# Altium footprint library Footprint-Lib-PhilsLab.PcbLib: 544 footprints (part 28 of 34)
Each footprint in its own frame and in the unit in brackets; x right, y up, seen from the top. Pads: shape width x height; smd on the part's side, far side on the other; paste and mask are expansions set on the pad; w line width, h text height; cw(c..) or ccw(c..) is an arc to the next point about the centre after c.
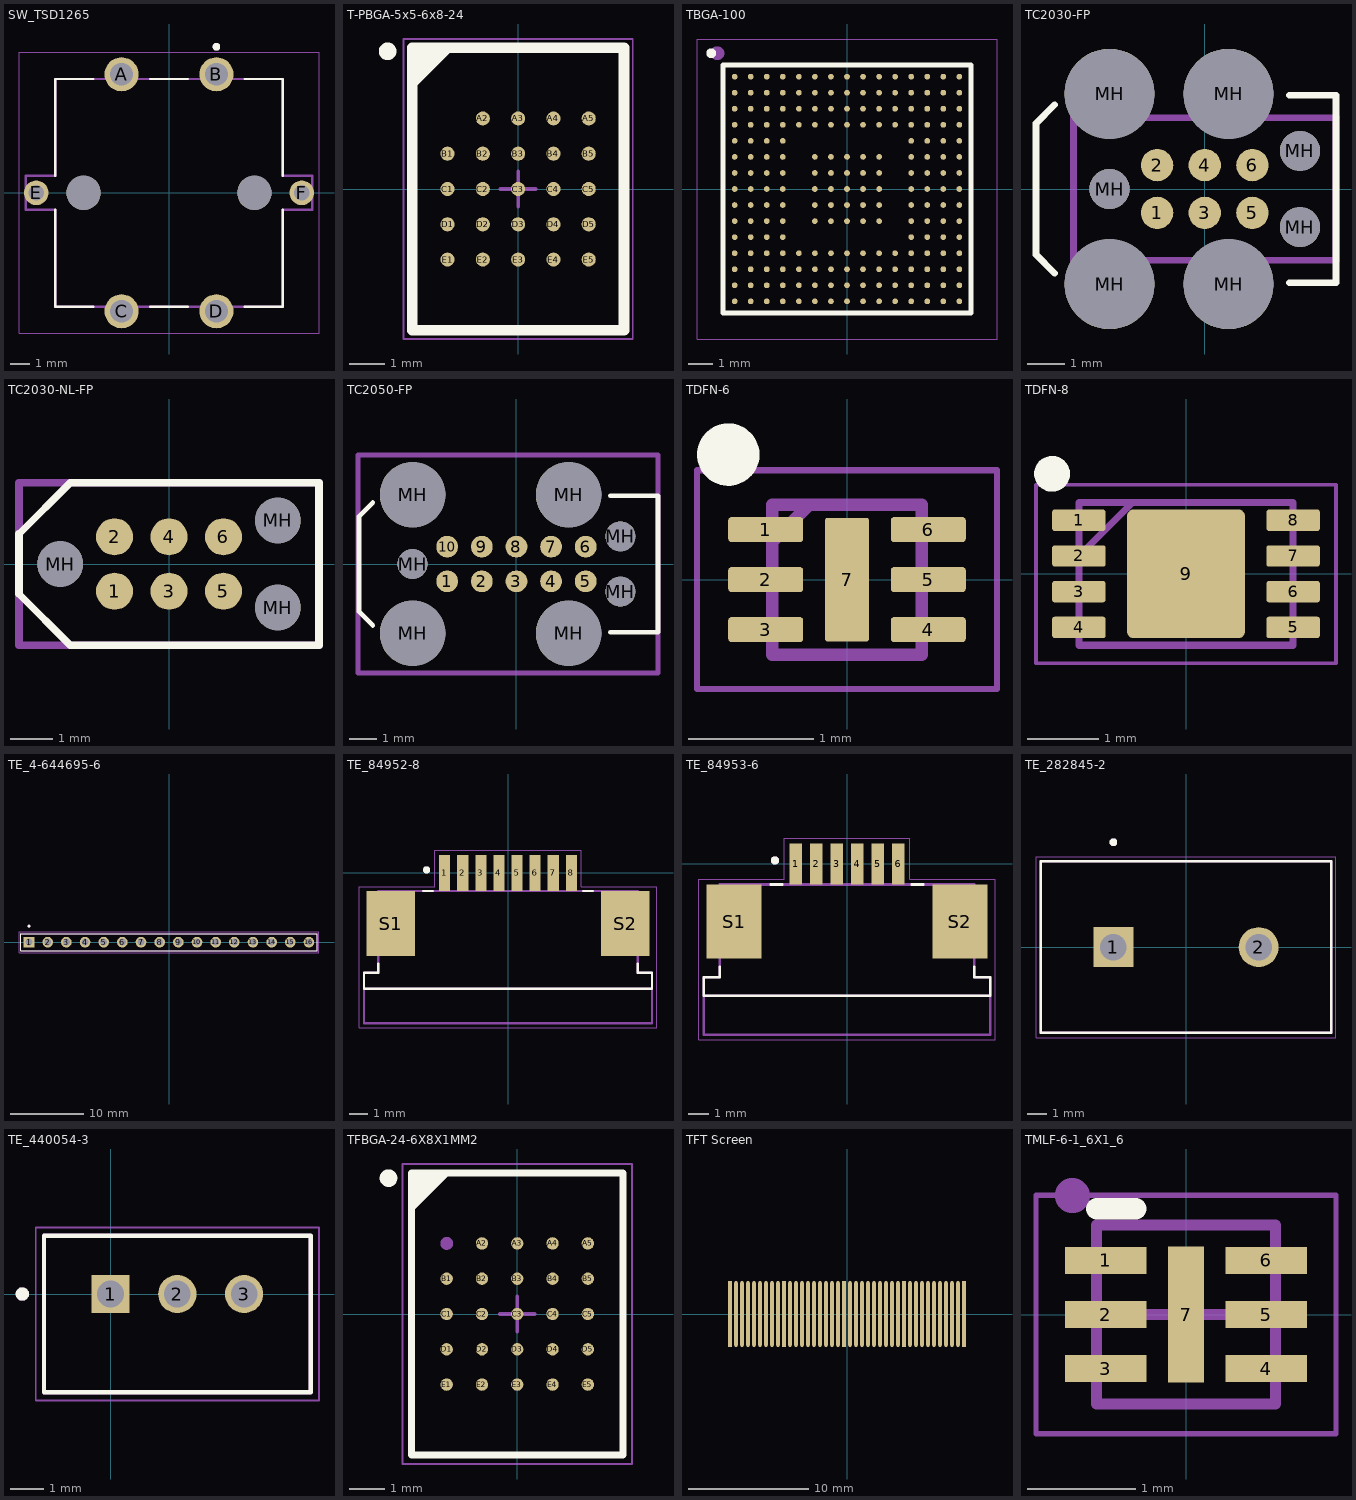
[diagram p27: the footprints below, top view; thin cyan lines are the x and y axes]

## SW_TSD1265 [mm]
pads (8):
  round 1.8 hole 1.2: A(-2.5,6.25) B(2.5,6.25) C(-2.5,-6.25) D(2.5,-6.25)
  round 1.308 hole 0.8: E(-7,0) F(7,0)
  round 1.8 hole 1.8 unplated: ""(-4.5,0) ""(4.5,0)
Top Overlay:
  circle w0.2: c2.5,7.7 r0.1
  lines w0.127: -6,-0.9 -6,-6 -4,-6 ; -6,0.9 -6,6 -4,6 ; -1,-6 1,-6 ; -1,6 1,6 ; 4,-6 6,-6 6,-0.9 ; 4,6 6,6 6,0.9
Mechanical 13:
  circle w0.2: c2.5,7.7 r0.1
  lines w0.127: -7.55,-0.9 -7.55,0.9 -6,0.9 -6,6 6,6 6,0.9 7.55,0.9 7.55,-0.9 6,-0.9 6,-6 -6,-6 -6,-0.9 -7.55,-0.9
Mechanical 15:
  lines w0.05: -7.91,-7.4 -7.91,7.4 7.91,7.4 7.91,-7.4 -7.91,-7.4
3D body "step_temp.STEP": height 6.5, standoff -5.7, extent -7.55,-6.65 7.55,6.65

## T-PBGA-5x5-6x8-24 [mm]
height 1.2
pads (24):
  round 0.4 smd mask+0.05: A2(-1,2) A3(0,2) A4(1,2) A5(2,2) B1(-2,1) B2(-1,1) B3(0,1) B4(1,1) B5(2,1) C1(-2,0) C2(-1,0) C3(0,0) C4(1,0) C5(2,0) D1(-2,-1) D2(-1,-1) D3(0,-1) D4(1,-1) D5(2,-1) E1(-2,-2) E2(-1,-2) E3(0,-2) E4(1,-2) E5(2,-2)
Top Overlay:
  circle w0.25: c-3.7,3.9 r0.125
  region: -2,4 -3,3 -3,4
  lines w0.3: -3,3 -2,4 ; -3,-4 -3,4 3,4 3,-4 -3,-4
Mechanical 13:
  lines w0.1: -3,-4 -3,4 3,4 3,-4 -3,-4
Mechanical 15:
  lines w0.05: -3.25,-4.25 -3.25,4.25 3.25,4.25 3.25,-4.25 -3.25,-4.25
  lines w0.1: -0.5,0 0.5,0 ; 0,-0.5 0,0.5
3D body "T-PBGA-5x5-6x8-24.step": height 1.2, standoff 0, extent -3,-4 3,4

## TBGA-100 [mm]
pads (201):
  round 0.232 smd: A1(-4.55,4.55) A2(-3.9,4.55) A3(-3.25,4.55) A4(-2.6,4.55) A5(-1.95,4.55) A6(-1.3,4.55) A7(-0.65,4.55) A8(0,4.55) A9(0.65,4.55) A10(1.3,4.55) A11(1.95,4.55) A12(2.6,4.55) A13(3.25,4.55) A14(3.9,4.55) A15(4.55,4.55) B1(-4.55,3.9) B2(-3.9,3.9) B3(-3.25,3.9) B4(-2.6,3.9) B5(-1.95,3.9) B6(-1.3,3.9) B7(-0.65,3.9) B8(0,3.9) B9(0.65,3.9) B10(1.3,3.9) B11(1.95,3.9) B12(2.6,3.9) B13(3.25,3.9) B14(3.9,3.9) B15(4.55,3.9) C1(-4.55,3.25) C2(-3.9,3.25) C3(-3.25,3.25) C4(-2.6,3.25) C5(-1.95,3.25) C6(-1.3,3.25) C7(-0.65,3.25) C8(0,3.25) C9(0.65,3.25) C10(1.3,3.25) C11(1.95,3.25) C12(2.6,3.25) C13(3.25,3.25) C14(3.9,3.25) C15(4.55,3.25) D1(-4.55,2.6) D2(-3.9,2.6) D3(-3.25,2.6) D4(-2.6,2.6) D5(-1.95,2.6) D6(-1.3,2.6) D7(-0.65,2.6) D8(0,2.6) D9(0.65,2.6) D10(1.3,2.6) D11(1.95,2.6) D12(2.6,2.6) D13(3.25,2.6) D14(3.9,2.6) D15(4.55,2.6) E1(-4.55,1.95) E2(-3.9,1.95) E3(-3.25,1.95) E4(-2.6,1.95) E12(2.6,1.95) E13(3.25,1.95) E14(3.9,1.95) E15(4.55,1.95) F1(-4.55,1.3) F2(-3.9,1.3) F3(-3.25,1.3) F4(-2.6,1.3) F6(-1.3,1.3) F7(-0.65,1.3) F8(0,1.3) F9(0.65,1.3) F10(1.3,1.3) F12(2.6,1.3) F13(3.25,1.3) F14(3.9,1.3) F15(4.55,1.3) G1(-4.55,0.65) G2(-3.9,0.65) G3(-3.25,0.65) G4(-2.6,0.65) G6(-1.3,0.65) G7(-0.65,0.65) G8(0,0.65) G9(0.65,0.65) G10(1.3,0.65) G12(2.6,0.65) G13(3.25,0.65) G14(3.9,0.65) G15(4.55,0.65) H1(-4.55,0) H2(-3.9,0) H3(-3.25,0) H4(-2.6,0) H6(-1.3,0) H7(-0.65,0) H8(0,0) H9(0.65,0) H10(1.3,0) H12(2.6,0) H13(3.25,0) H14(3.9,0) H15(4.55,0) J1(-4.55,-0.65) J2(-3.9,-0.65) J3(-3.25,-0.65) J4(-2.6,-0.65) J6(-1.3,-0.65) J7(-0.65,-0.65) J8(0,-0.65) J9(0.65,-0.65) J10(1.3,-0.65) J12(2.6,-0.65) J13(3.25,-0.65) J14(3.9,-0.65) J15(4.55,-0.65) K1(-4.55,-1.3) K2(-3.9,-1.3) K3(-3.25,-1.3) K4(-2.6,-1.3) K6(-1.3,-1.3) K7(-0.65,-1.3) K8(0,-1.3) K9(0.65,-1.3) K10(1.3,-1.3) K12(2.6,-1.3) K13(3.25,-1.3) K14(3.9,-1.3) K15(4.55,-1.3) L1(-4.55,-1.95) L2(-3.9,-1.95) L3(-3.25,-1.95) L4(-2.6,-1.95) L12(2.6,-1.95) L13(3.25,-1.95) L14(3.9,-1.95) L15(4.55,-1.95) M1(-4.55,-2.6) M2(-3.9,-2.6) M3(-3.25,-2.6) M4(-2.6,-2.6) M5(-1.95,-2.6) M6(-1.3,-2.6) M7(-0.65,-2.6) M8(0,-2.6) M9(0.65,-2.6) M10(1.3,-2.6) M11(1.95,-2.6) M12(2.6,-2.6) M13(3.25,-2.6) M14(3.9,-2.6) M15(4.55,-2.6) N1(-4.55,-3.25) N2(-3.9,-3.25) N3(-3.25,-3.25) N4(-2.6,-3.25) N5(-1.95,-3.25) N6(-1.3,-3.25) N7(-0.65,-3.25) N8(0,-3.25) N9(0.65,-3.25) N10(1.3,-3.25) N11(1.95,-3.25) N12(2.6,-3.25) N13(3.25,-3.25) N14(3.9,-3.25) N15(4.55,-3.25) P1(-4.55,-3.9) P2(-3.9,-3.9) P3(-3.25,-3.9) P4(-2.6,-3.9) P5(-1.95,-3.9) P6(-1.3,-3.9) P7(-0.65,-3.9) P8(0,-3.9) P9(0.65,-3.9) P10(1.3,-3.9) P11(1.95,-3.9) P12(2.6,-3.9) P13(3.25,-3.9) P14(3.9,-3.9) P15(4.55,-3.9) R1(-4.55,-4.55) R2(-3.9,-4.55) R3(-3.25,-4.55) R4(-2.6,-4.55) R5(-1.95,-4.55) R6(-1.3,-4.55) R7(-0.65,-4.55) R8(0,-4.55) R9(0.65,-4.55) R10(1.3,-4.55) R11(1.95,-4.55) R12(2.6,-4.55) R13(3.25,-4.55) R14(3.9,-4.55) R15(4.55,-4.55)
Top Overlay:
  circle w0.2: c-5.5,5.5 r0.1
  lines w0.2: -5.016,-5.016 5.016,-5.016 5.016,5.016 -5.016,5.016 -5.016,-5.016
Mechanical 13:
  circle w0.5: c-5.25,5.5 r0.031
  lines w0.1: -5,-5 5,-5 5,5 -5,5 -5,-5
  text "'.Designator'" at -5.815,-0.9 h1
Mechanical 15:
  lines w0.05: -6.075,-6.075 6.075,-6.075 6.075,6.075 -6.075,6.075 -6.075,-6.075
3D body "STM32H730IBK6Q.stp": height 0.6, standoff 0, extent -5,-5 5,5

## TC2030-FP [mm]
pads (13):
  round 0.863 smd paste-0.432: 1(-1.27,-0.635) 2(-1.27,0.635) 3(0,-0.635) 4(0,0.635) 5(1.27,-0.635) 6(1.27,0.635)
  round 2.4 hole 2.4 unplated: MH(-2.54,-2.54) MH(-2.54,2.54) MH(0.635,-2.54) MH(0.635,2.54)
  round 1.067 hole 1.067 unplated: MH(-2.54,0) MH(2.54,-1.016) MH(2.54,1.016)
Top Overlay:
  lines w0.175: -4,-2.25 -4.5,-1.75 -4.5,1.75 -4,2.25 ; 2.25,-2.5 3.5,-2.5 3.5,2.5 2.25,2.5
Mechanical 13:
  lines w0.175: -3.5,-1.9 -3.5,1.9 3.5,1.9 3.5,-1.9 -3.5,-1.9
  text "'.Designator'" at -8.633,-0.635 h1.52

## TC2030-NL-FP [mil]
pads (9):
  round 33.98 smd paste-16.99: 1(-50,-25) 2(-50,25) 3(0,-25) 4(0,25) 5(50,-25) 6(50,25)
  round 42.01 hole 42.01 unplated: MH(-100,0) MH(100,-40) MH(100,40)
Top Overlay:
  lines w6.89: -137.8,-27.56 -137.8,27.56 -90.55,74.8 137.8,74.8 137.8,-74.8 -90.55,-74.8 -137.8,-27.56
Mechanical 13:
  lines w6.89: -137.8,-74.8 -137.8,74.8 137.8,74.8 137.8,-74.8 -137.8,-74.8
  text "'.Designator'" at -339.89,-24.99 h60

## TC2050-FP [mm]
pads (17):
  round 0.8 smd paste-0.4: 1(-2.54,-0.635) 2(-1.27,-0.635) 3(0,-0.635) 4(1.27,-0.635) 5(2.54,-0.635) 6(2.54,0.635) 7(1.27,0.635) 8(0,0.635) 9(-1.27,0.635) 10(-2.54,0.635)
  round 2.4 hole 2.4 unplated: MH(-3.81,-2.54) MH(-3.81,2.54) MH(1.91,-2.54) MH(1.91,2.54)
  round 1.1 hole 1.1 unplated: MH(-3.81,0) MH(3.81,-1.016) MH(3.81,1.016)
Top Overlay:
  lines w0.175: -5.27,-2.25 -5.77,-1.75 -5.77,1.75 -5.27,2.25 ; 3.44,-2.5 5.19,-2.5 5.19,2.5 3.44,2.5
Mechanical 13:
  lines w0.175: -5.81,-4 5.19,-4 5.19,4 -5.81,4 -5.81,-4
  text "'.Designator'" at -8.633,-0.635 h1.52

## TDFN-6 [mm]
pads (7):
  rrect25% 0.6x0.2 smd mask+0.05: 1(-0.65,0.4) 2(-0.65,0) 3(-0.65,-0.4) 4(0.65,-0.4) 5(0.65,0) 6(0.65,0.4)
  rrect10% 0.35x0.99 smd mask+0.05: 7(0,0)
Top Overlay:
  circle w0.25: c-0.95,1 r0.125
Mechanical 13:
  lines w0.1: -0.6,0.3 -0.3,0.6 ; -0.6,-0.6 -0.6,0.6 0.6,0.6 0.6,-0.6 -0.6,-0.6
  text "'.Designator'" at -5.84,-0.925 h1
Mechanical 15:
  lines w0.05: -1.2,-0.875 -1.2,0.875 1.2,0.875 1.2,-0.875 -1.2,-0.875
3D body "MIC5528-3.3YMT-TR.stp": height 0.6, standoff 0, extent -0.65,-0.6 0.65,0.6

## TDFN-8 [mm]
pads (9):
  rrect25% 0.75x0.3 smd mask+0.05: 1(-1.5,0.75) 2(-1.5,0.25) 3(-1.5,-0.25) 4(-1.5,-0.75) 5(1.5,-0.75) 6(1.5,-0.25) 7(1.5,0.25) 8(1.5,0.75)
  rrect10% 1.65x1.8 smd mask+0.05: 9(0,0)
Top Overlay:
  circle w0.25: c-1.875,1.4 r0.125
Mechanical 13:
  lines w0.1: -1.5,0.25 -0.75,1 ; -1.5,-1 -1.5,1 1.5,1 1.5,-1 -1.5,-1
  text "'.Designator'" at -5.84,-0.925 h1
Mechanical 15:
  lines w0.05: -2.1,-1.25 -2.1,1.25 2.1,1.25 2.1,-1.25 -2.1,-1.25
3D body "MCP2557FDT-H_MNY.stp": height 0.8, standoff 0, extent -1.55,-1 1.55,1

## TE_4-644695-6 [mm]
pads (16):
  rect 1.448x1.448 hole 0.94: 1(-19.05,0)
  round 1.448 hole 0.94: 2(-16.51,0) 3(-13.97,0) 4(-11.43,0) 5(-8.89,0) 6(-6.35,0) 7(-3.81,0) 8(-1.27,0) 9(1.27,0) 10(3.81,0) 11(6.35,0) 12(8.89,0) 13(11.43,0) 14(13.97,0) 15(16.51,0) 16(19.05,0)
Top Overlay:
  circle w0.2: c-19.05,2.168 r0.1
  lines w0.127: -20.168,-1.168 -20.168,1.168 20.168,1.168 20.168,-1.168 -20.168,-1.168
Mechanical 13:
  circle w0.2: c-19.05,2.168 r0.1
  lines w0.127: -20.168,-1.168 -20.168,1.168 20.168,1.168 20.168,-1.168 -20.168,-1.168
Mechanical 15:
  lines w0.05: -20.418,-1.418 -20.418,1.418 20.418,1.418 20.418,-1.418 -20.418,-1.418

## TE_84952-8 [mm]
pads (10):
  rect 0.61x2 smd: 1(-3.5,0) 2(-2.5,0) 3(-1.5,0) 4(-0.5,0) 5(0.5,0) 6(1.5,0) 7(2.5,0) 8(3.5,0)
  rect 2.68x3.6 smd: S1(-6.49,-2.8) S2(6.49,-2.8)
Top Overlay:
  circle w0.2: c-4.5,0.17 r0.1
  lines w0.127: -7.175,-5 -7.175,-5.51 -7.96,-5.51 -7.96,-6.4 7.96,-6.4 7.96,-5.51 7.175,-5.51 7.175,-5 ; -4.7,-1 -4.14,-1 ; 4.14,-1 4.7,-1
Mechanical 13:
  circle w0.2: c-4.5,0.17 r0.1
  lines w0.127: -7.96,-6.4 -7.96,-5.51 -7.175,-5.51 -7.175,-1 7.175,-1 7.175,-5.51 7.96,-5.51 7.96,-6.4 ; -7.96,-6.4 7.96,-6.4 ; -7.96,-6.4 -7.96,-8.3 7.96,-8.3 7.96,-6.4
Mechanical 15:
  lines w0.05: -8.21,-8.55 -8.21,-0.75 -4.055,-0.75 -4.055,1.25 4.055,1.25 4.055,-0.75 8.21,-0.75 8.21,-8.55 -8.21,-8.55
3D body "Download_STP_68610814122_rev1.stp": height 3, standoff 0, extent -7.5,-6.25 7.5,0.85

## TE_84953-6 [mm]
height 2.74
pads (8):
  rect 0.61x2 smd paste+0 mask+0.102: 1(-2.5,0) 2(-1.5,0) 3(-0.5,0) 4(0.5,0) 5(1.5,0) 6(2.5,0)
  rect 2.68x3.6 smd paste+0 mask+0.102: S1(-5.49,-2.8) S2(5.49,-2.8)
Top Overlay:
  circle w0.2: c-3.5,0.17 r0.1
  lines w0.127: -6.175,-5 -6.175,-5.51 -6.96,-5.51 -6.96,-6.4 6.96,-6.4 6.96,-5.51 6.175,-5.51 6.175,-5 ; -3.7,-1 -3.14,-1 ; 3.14,-1 3.7,-1
Mechanical 13:
  circle w0.2: c-3.5,0.17 r0.1
  lines w0.127: -6.96,-6.4 -6.96,-8.3 6.96,-8.3 6.96,-6.4 ; -6.96,-6.4 6.96,-6.4 ; -6.96,-6.4 -6.96,-5.51 -6.175,-5.51 -6.175,-1 6.175,-1 6.175,-5.51 6.96,-5.51 6.96,-6.4
Mechanical 15:
  lines w0.05: -7.21,-8.55 7.21,-8.55 7.21,-0.75 3.055,-0.75 3.055,1.25 -3.055,1.25 -3.055,-0.75 -7.21,-0.75 -7.21,-8.55
3D body "step_temp.STEP": height 1.26, standoff -1.4, extent -6.965,-1.04 6.965,5.51

## TE_282845-2 [mm]
pads (2):
  rect 2.1x2.1 hole 1.4: 1(-3.81,0)
  round 2.1 hole 1.4: 2(3.81,0)
Top Overlay:
  circle w0.2: c-3.81,5.5 r0.1
  lines w0.127: -7.62,-4.5 7.62,-4.5 7.62,4.5 -7.62,4.5 -7.62,-4.5
Mechanical 13:
  circle w0.2: c-3.81,5.5 r0.1
  lines w0.127: -7.62,-4.5 7.62,-4.5 7.62,4.5 -7.62,4.5 -7.62,-4.5
Mechanical 15:
  lines w0.05: -7.87,-4.75 -7.87,4.75 7.87,4.75 7.87,-4.75 -7.87,-4.75

## TE_440054-3 [mm]
pads (3):
  rect 1.15x1.15 hole 0.8: 1(0,0)
  round 1.15 hole 0.8: 2(2.007,0) 3(4.013,0)
Top Overlay:
  circle w0.2: c-2.65,0 r0.1
  lines w0.127: -2,-2.95 -2,1.75 6.013,1.75 6.013,-2.95 -2,-2.95
Mechanical 13:
  circle w0.2: c-2.65,0 r0.1
  lines w0.127: -2,-2.95 -2,1.75 6.013,1.75 6.013,-2.95 ; -2,-2.95 6.013,-2.95 ; -2,-2.95 6.013,-2.95
Mechanical 15:
  lines w0.05: -2.25,-3.2 -2.25,2 6.263,2 6.263,-3.2 -2.25,-3.2

## TFBGA-24-6X8X1MM2 [mm]
height 1.2
pads (24):
  round 0.35 smd: A2(-1,2) A3(0,2) A4(1,2) A5(2,2) B1(-2,1) B2(-1,1) B3(0,1) B4(1,1) B5(2,1) C1(-2,0) C2(-1,0) C3(0,0) C4(1,0) C5(2,0) D1(-2,-1) D2(-1,-1) D3(0,-1) D4(1,-1) D5(2,-1) E1(-2,-2) E2(-1,-2) E3(0,-2) E4(1,-2) E5(2,-2)
Top Overlay:
  circle w0.25: c-3.65,3.85 r0.125
  region: -2,4 -3,3 -3,4
  lines w0.2: -3,3 -2,4 ; -3,-4 -3,4 3,4 3,-4 -3,-4
Mechanical 13:
  circle w0.254: c-2,2 r0.053
  lines w0.1: -3,-4 -3,4 3,4 3,-4 -3,-4
  text ".Designator" at -4.998,-0.333 h1
Mechanical 15:
  lines w0.05: -3.25,-4.25 -3.25,4.25 3.25,4.25 3.25,-4.25 -3.25,-4.25
  lines w0.1: -0.5,0 0.5,0 ; 0,-0.5 0,0.5
3D body "TFBGA-24-6X8X1MM2.step": height 1.2, standoff 0, extent -3,-4 3,4

## TFT Screen [mm] "3.5 INCH TFT SCREEN"
pads (80):
  rect 0.3x5.5 smd: 1(-9.75,0) 1(-9.75,0) 10(-5.25,0) 10(-5.25,0) 20(-0.25,0) 20(-0.25,0) 30(4.75,0) 30(4.75,0) 40(9.75,0) 40(9.75,0)
  oval 0.3x5.5 smd: 2(-9.25,0) 2(-9.25,0) 3(-8.75,0) 3(-8.75,0) 4(-8.25,0) 4(-8.25,0) 5(-7.75,0) 5(-7.75,0) 6(-7.25,0) 6(-7.25,0) 7(-6.75,0) 7(-6.75,0) 8(-6.25,0) 8(-6.25,0) 9(-5.75,0) 9(-5.75,0) 11(-4.75,0) 11(-4.75,0) 12(-4.25,0) 12(-4.25,0) 13(-3.75,0) 13(-3.75,0) 14(-3.25,0) 14(-3.25,0) 15(-2.75,0) 15(-2.75,0) 16(-2.25,0) 16(-2.25,0) 17(-1.75,0) 17(-1.75,0) 18(-1.25,0) 18(-1.25,0) 19(-0.75,0) 19(-0.75,0) 21(0.25,0) 21(0.25,0) 22(0.75,0) 22(0.75,0) 23(1.25,0) 23(1.25,0) 24(1.75,0) 24(1.75,0) 25(2.25,0) 25(2.25,0) 26(2.75,0) 26(2.75,0) 27(3.25,0) 27(3.25,0) 28(3.75,0) 28(3.75,0) 29(4.25,0) 29(4.25,0) 31(5.25,0) 31(5.25,0) 32(5.75,0) 32(5.75,0) 33(6.25,0) 33(6.25,0) 34(6.75,0) 34(6.75,0) 35(7.25,0) 35(7.25,0) 36(7.75,0) 36(7.75,0) 37(8.25,0) 37(8.25,0) 38(8.75,0) 38(8.75,0) 39(9.25,0) 39(9.25,0)
3D body "(updated)ER-TFT035-6_3D.STEP": height 3.05, standoff -0.8, extent -28.315,-45.355 28.225,39.605

## TMLF-6-1_6X1_6 [mm]
height 0.6
pads (7):
  rect 0.75x0.25 smd mask+0.15: 1(-0.74,0.5) 2(-0.74,0) 3(-0.74,-0.5) 4(0.74,-0.5) 5(0.74,0) 6(0.74,0.5)
  rect 0.33x1.26 smd mask+0.15: 7(0,0)
Top Overlay:
  lines w0.2: -0.825,0.975 -0.465,0.975
Mechanical 13:
  circle w0.3: c-1.05,1.098 r0.011
  lines w0.1: -0.825,-0.825 -0.825,0.825 0.825,0.825 0.825,-0.825 -0.825,-0.825
  text "'.Designator'" at -5.815,-0.9 h1
Mechanical 15:
  lines w0.05: -1.385,-1.1 -1.385,1.1 1.385,1.1 1.385,-1.1 -1.385,-1.1
  lines w0.1: -0.5,0 0.5,0 ; 0,-0.5 0,0.5
3D body "TMLF-6-1_6X1_6.step": height 0.6, standoff 0, extent -0.826,-0.825 0.826,0.825